# Altium footprint library WR-TBL_Pluggable Connector_3.81mm.PcbLib: 201 footprints (part 13 of 13)
Each footprint in its own frame and in the unit in brackets; x right, y up, seen from the top. Pads: shape width x height; smd on the part's side, far side on the other; paste and mask are expansions set on the pad; w line width, h text height; cw(c..) or ccw(c..) is an arc to the next point about the centre after c.
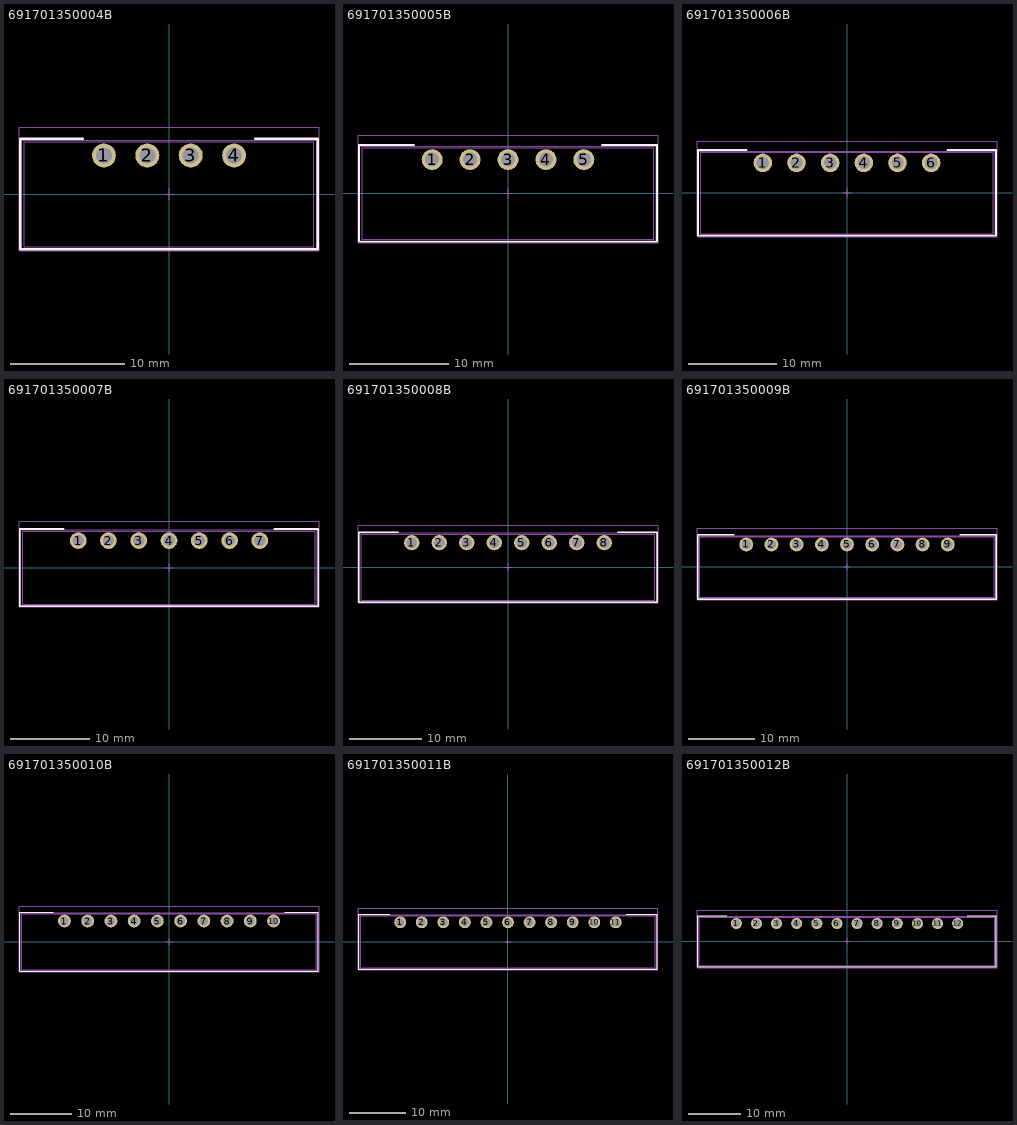
[diagram p12: the footprints below, top view; thin cyan lines are the x and y axes]

## 691701350004B [mm] "Horizontal PCB Header THR Type with Flanges, pitch 3.81mm, 04p"
height 7.3
pads (4):
  round 2.1 hole 1.4: 1(-5.715,3.4) 2(-1.905,3.4) 3(1.905,3.4) 4(5.715,3.4)
Top Overlay:
  lines w0.2: -7.56,4.85 -13.065,4.85 -13.065,-4.85 13.065,-4.85 13.065,4.85 7.56,4.85
Top Paste:
  region: -3.455,5.65 -0.355,5.65 -0.355,1.15 -3.455,1.15
  region: -7.265,5.65 -4.165,5.65 -4.165,1.15 -7.265,1.15
  region: 0.355,5.65 3.455,5.65 3.455,1.15 0.355,1.15
  region: 4.165,5.65 7.265,5.65 7.265,1.15 4.165,1.15
Assembly Notes:
  text "Stencil thickness : 120 μm" at -5.156,-5.651 h1
Top Assembly:
  lines w0.1: -12.965,-4.75 -12.965,4.75 12.965,4.75 12.965,-4.75 -12.965,-4.75
Top Designator:
  text ".Designator" at -3.647,-0.357 h1
Top 3D Body:
  lines w0.1: -12.715,-4.6 -12.715,4.6 12.715,4.6 12.715,-4.6 -12.715,-4.6
Top Courtyard:
  lines w0.05: -13.165,-4.95 -13.165,5.85 13.165,5.85 13.165,-4.95 -13.165,-4.95
Top Component Center:
  lines w0.1: -0.5,0 0.5,0 ; 0,-0.5 0,0.5
3D body "691701350004B.stp": height 7.1, standoff -2.5, extent -12.715,-4.61 12.715,4.6

## 691701350005B [mm] "Horizontal PCB Header THR Type with Flanges, pitch 3.81mm, 05p"
height 7.3
pads (5):
  round 2.1 hole 1.4: 1(-7.62,3.4) 2(-3.81,3.4) 3(0,3.4) 4(3.81,3.4) 5(7.62,3.4)
Top Overlay:
  lines w0.2: -9.465,4.85 -14.97,4.85 -14.97,-4.85 14.97,-4.85 14.97,4.85 9.465,4.85
Top Paste:
  region: 6.07,5.65 9.17,5.65 9.17,1.15 6.07,1.15
  region: 2.26,5.65 5.36,5.65 5.36,1.15 2.26,1.15
  region: -1.55,5.65 1.55,5.65 1.55,1.15 -1.55,1.15
  region: -9.17,5.65 -6.07,5.65 -6.07,1.15 -9.17,1.15
  region: -5.36,5.65 -2.26,5.65 -2.26,1.15 -5.36,1.15
Assembly Notes:
  text "Stencil thickness : 120 μm" at -5.156,-5.651 h1
Top Assembly:
  lines w0.1: -14.87,-4.75 -14.87,4.75 14.87,4.75 14.87,-4.75 -14.87,-4.75
Top Designator:
  text ".Designator" at -3.647,-0.357 h1
Top 3D Body:
  lines w0.1: -14.62,-4.6 -14.62,4.6 14.62,4.6 14.62,-4.6 -14.62,-4.6
Top Courtyard:
  lines w0.05: -15.07,-4.95 -15.07,5.85 15.07,5.85 15.07,-4.95 -15.07,-4.95
Top Component Center:
  lines w0.1: -0.5,0 0.5,0 ; 0,-0.5 0,0.5
3D body "691701350005B.stp": height 7.1, standoff -2.5, extent -14.62,-4.61 14.62,4.6

## 691701350006B [mm] "Horizontal PCB Header THR Type with Flanges, pitch 3.81mm, 06p"
height 7.3
pads (6):
  round 2.1 hole 1.4: 1(-9.525,3.4) 2(-5.715,3.4) 3(-1.905,3.4) 4(1.905,3.4) 5(5.715,3.4) 6(9.525,3.4)
Top Overlay:
  lines w0.2: -11.37,4.85 -16.875,4.85 -16.875,-4.85 16.875,-4.85 16.875,4.85 11.37,4.85
Top Paste:
  region: 4.165,5.65 7.265,5.65 7.265,1.15 4.165,1.15
  region: 0.355,5.65 3.455,5.65 3.455,1.15 0.355,1.15
  region: -3.455,5.65 -0.355,5.65 -0.355,1.15 -3.455,1.15
  region: -11.075,5.65 -7.975,5.65 -7.975,1.15 -11.075,1.15
  region: -7.265,5.65 -4.165,5.65 -4.165,1.15 -7.265,1.15
  region: 7.975,5.65 11.075,5.65 11.075,1.15 7.975,1.15
Assembly Notes:
  text "Stencil thickness : 120 μm" at -5.156,-5.651 h1
Top Assembly:
  lines w0.1: -16.775,-4.75 -16.775,4.75 16.775,4.75 16.775,-4.75 -16.775,-4.75
Top Designator:
  text ".Designator" at -3.647,-0.357 h1
Top 3D Body:
  lines w0.1: -16.525,-4.6 -16.525,4.6 16.525,4.6 16.525,-4.6 -16.525,-4.6
Top Courtyard:
  lines w0.05: -16.975,-4.95 -16.975,5.85 16.975,5.85 16.975,-4.95 -16.975,-4.95
Top Component Center:
  lines w0.1: -0.5,0 0.5,0 ; 0,-0.5 0,0.5
3D body "691701350006B.stp": height 7.1, standoff -2.5, extent -16.525,-4.61 16.525,4.6

## 691701350007B [mm] "Horizontal PCB Header THR Type with Flanges, pitch 3.81mm, 07p"
height 7.3
pads (7):
  round 2.1 hole 1.4: 1(-11.43,3.4) 2(-7.62,3.4) 3(-3.81,3.4) 4(0,3.4) 5(3.81,3.4) 6(7.62,3.4) 7(11.43,3.4)
Top Overlay:
  lines w0.2: -13.275,4.85 -18.78,4.85 -18.78,-4.85 18.78,-4.85 18.78,4.85 13.275,4.85
Top Paste:
  region: 6.07,5.65 9.17,5.65 9.17,1.15 6.07,1.15
  region: -9.17,5.65 -6.07,5.65 -6.07,1.15 -9.17,1.15
  region: -12.98,5.65 -9.88,5.65 -9.88,1.15 -12.98,1.15
  region: -5.36,5.65 -2.26,5.65 -2.26,1.15 -5.36,1.15
  region: -1.55,5.65 1.55,5.65 1.55,1.15 -1.55,1.15
  region: 2.26,5.65 5.36,5.65 5.36,1.15 2.26,1.15
  region: 9.88,5.65 12.98,5.65 12.98,1.15 9.88,1.15
Assembly Notes:
  text "Stencil thickness : 120 μm" at -5.156,-5.651 h1
Top Assembly:
  lines w0.1: -18.68,-4.75 -18.68,4.75 18.68,4.75 18.68,-4.75 -18.68,-4.75
Top Designator:
  text ".Designator" at -3.647,-0.357 h1
Top 3D Body:
  lines w0.1: -18.43,-4.6 -18.43,4.6 18.43,4.6 18.43,-4.6 -18.43,-4.6
Top Courtyard:
  lines w0.05: -18.88,-4.95 -18.88,5.85 18.88,5.85 18.88,-4.95 -18.88,-4.95
Top Component Center:
  lines w0.1: -0.5,0 0.5,0 ; 0,-0.5 0,0.5
3D body "691701350007B.stp": height 7.1, standoff -2.5, extent -18.43,-4.6 18.43,4.61

## 691701350008B [mm] "Horizontal PCB Header THR Type with Flanges, pitch 3.81mm, 08p"
height 7.3
pads (8):
  round 2.1 hole 1.4: 1(-13.335,3.4) 2(-9.525,3.4) 3(-5.715,3.4) 4(-1.905,3.4) 5(1.905,3.4) 6(5.715,3.4) 7(9.525,3.4) 8(13.335,3.4)
Top Overlay:
  lines w0.2: -15.18,4.85 -20.685,4.85 -20.685,-4.85 20.685,-4.85 20.685,4.85 15.18,4.85
Top Paste:
  region: 11.785,5.65 14.885,5.65 14.885,1.15 11.785,1.15
  region: 4.165,5.65 7.265,5.65 7.265,1.15 4.165,1.15
  region: -11.075,5.65 -7.975,5.65 -7.975,1.15 -11.075,1.15
  region: -14.885,5.65 -11.785,5.65 -11.785,1.15 -14.885,1.15
  region: -7.265,5.65 -4.165,5.65 -4.165,1.15 -7.265,1.15
  region: -3.455,5.65 -0.355,5.65 -0.355,1.15 -3.455,1.15
  region: 0.355,5.65 3.455,5.65 3.455,1.15 0.355,1.15
  region: 7.975,5.65 11.075,5.65 11.075,1.15 7.975,1.15
Assembly Notes:
  text "Stencil thickness : 120 μm" at -5.156,-5.651 h1
Top Assembly:
  lines w0.1: -20.585,-4.75 -20.585,4.75 20.585,4.75 20.585,-4.75 -20.585,-4.75
Top Designator:
  text ".Designator" at -3.647,-0.357 h1
Top 3D Body:
  lines w0.1: -20.335,-4.6 -20.335,4.6 20.335,4.6 20.335,-4.6 -20.335,-4.6
Top Courtyard:
  lines w0.05: -20.785,-4.95 -20.785,5.85 20.785,5.85 20.785,-4.95 -20.785,-4.95
Top Component Center:
  lines w0.1: -0.5,0 0.5,0 ; 0,-0.5 0,0.5
3D body "691701350008B.stp": height 7.1, standoff -2.5, extent -20.335,-4.61 20.335,4.6

## 691701350009B [mm] "Horizontal PCB Header THR Type with Flanges, pitch 3.81mm, 09p"
height 7.3
pads (9):
  round 2.1 hole 1.4: 1(-15.24,3.4) 2(-11.43,3.4) 3(-7.62,3.4) 4(-3.81,3.4) 5(0,3.4) 6(3.81,3.4) 7(7.62,3.4) 8(11.43,3.4) 9(15.24,3.4)
Top Overlay:
  lines w0.2: -17.085,4.85 -22.59,4.85 -22.59,-4.85 22.59,-4.85 22.59,4.85 17.085,4.85
Top Paste:
  region: 13.69,5.65 16.79,5.65 16.79,1.15 13.69,1.15
  region: 9.88,5.65 12.98,5.65 12.98,1.15 9.88,1.15
  region: 2.26,5.65 5.36,5.65 5.36,1.15 2.26,1.15
  region: -12.98,5.65 -9.88,5.65 -9.88,1.15 -12.98,1.15
  region: -16.79,5.65 -13.69,5.65 -13.69,1.15 -16.79,1.15
  region: -9.17,5.65 -6.07,5.65 -6.07,1.15 -9.17,1.15
  region: -5.36,5.65 -2.26,5.65 -2.26,1.15 -5.36,1.15
  region: -1.55,5.65 1.55,5.65 1.55,1.15 -1.55,1.15
  region: 6.07,5.65 9.17,5.65 9.17,1.15 6.07,1.15
Assembly Notes:
  text "Stencil thickness : 120 μm" at -5.156,-5.651 h1
Top Assembly:
  lines w0.1: -22.49,-4.75 -22.49,4.75 22.49,4.75 22.49,-4.75 -22.49,-4.75
Top Designator:
  text ".Designator" at -3.647,-0.357 h1
Top 3D Body:
  lines w0.1: -22.24,-4.6 -22.24,4.6 22.24,4.6 22.24,-4.6 -22.24,-4.6
Top Courtyard:
  lines w0.05: -22.69,-4.95 -22.69,5.85 22.69,5.85 22.69,-4.95 -22.69,-4.95
Top Component Center:
  lines w0.1: -0.5,0 0.5,0 ; 0,-0.5 0,0.5
3D body "691701350009B.stp": height 7.1, standoff -2.5, extent -22.24,-4.61 22.24,4.6

## 691701350010B [mm] "Horizontal PCB Header THR Type with Flanges, pitch 3.81mm, 10p"
height 7.3
pads (10):
  round 2.1 hole 1.4: 1(-17.145,3.4) 2(-13.335,3.4) 3(-9.525,3.4) 4(-5.715,3.4) 5(-1.905,3.4) 6(1.905,3.4) 7(5.715,3.4) 8(9.525,3.4) 9(13.335,3.4) 10(17.145,3.4)
Top Overlay:
  lines w0.2: -18.99,4.85 -24.495,4.85 -24.495,-4.85 24.495,-4.85 24.495,4.85 18.99,4.85
Top Paste:
  region: 11.785,5.65 14.885,5.65 14.885,1.15 11.785,1.15
  region: 7.975,5.65 11.075,5.65 11.075,1.15 7.975,1.15
  region: 0.355,5.65 3.455,5.65 3.455,1.15 0.355,1.15
  region: -14.885,5.65 -11.785,5.65 -11.785,1.15 -14.885,1.15
  region: -18.695,5.65 -15.595,5.65 -15.595,1.15 -18.695,1.15
  region: -11.075,5.65 -7.975,5.65 -7.975,1.15 -11.075,1.15
  region: -7.265,5.65 -4.165,5.65 -4.165,1.15 -7.265,1.15
  region: -3.455,5.65 -0.355,5.65 -0.355,1.15 -3.455,1.15
  region: 4.165,5.65 7.265,5.65 7.265,1.15 4.165,1.15
  region: 15.595,5.65 18.695,5.65 18.695,1.15 15.595,1.15
Assembly Notes:
  text "Stencil thickness : 120 μm" at -5.156,-5.651 h1
Top Assembly:
  lines w0.1: -24.395,-4.75 -24.395,4.75 24.395,4.75 24.395,-4.75 -24.395,-4.75
Top Designator:
  text ".Designator" at -3.647,-0.357 h1
Top 3D Body:
  lines w0.1: -24.145,-4.6 -24.145,4.6 24.145,4.6 24.145,-4.6 -24.145,-4.6
Top Courtyard:
  lines w0.05: -24.595,-4.95 -24.595,5.85 24.595,5.85 24.595,-4.95 -24.595,-4.95
Top Component Center:
  lines w0.1: -0.5,0 0.5,0 ; 0,-0.5 0,0.5
3D body "691701350010B.stp": height 7.1, standoff -2.5, extent -24.145,-4.61 24.145,4.6

## 691701350011B [mm] "Horizontal PCB Header THR Type with Flanges, pitch 3.81mm, 11p"
height 7.3
pads (11):
  round 2.1 hole 1.4: 1(-19.05,3.4) 2(-15.24,3.4) 3(-11.43,3.4) 4(-7.62,3.4) 5(-3.81,3.4) 6(0,3.4) 7(3.81,3.4) 8(7.62,3.4) 9(11.43,3.4) 10(15.24,3.4) 11(19.05,3.4)
Top Overlay:
  lines w0.2: -20.895,4.85 -26.4,4.85 -26.4,-4.85 26.4,-4.85 26.4,4.85 20.895,4.85
Top Paste:
  region: 9.88,5.65 12.98,5.65 12.98,1.15 9.88,1.15
  region: 6.07,5.65 9.17,5.65 9.17,1.15 6.07,1.15
  region: -1.55,5.65 1.55,5.65 1.55,1.15 -1.55,1.15
  region: -16.79,5.65 -13.69,5.65 -13.69,1.15 -16.79,1.15
  region: -20.6,5.65 -17.5,5.65 -17.5,1.15 -20.6,1.15
  region: -12.98,5.65 -9.88,5.65 -9.88,1.15 -12.98,1.15
  region: -9.17,5.65 -6.07,5.65 -6.07,1.15 -9.17,1.15
  region: -5.36,5.65 -2.26,5.65 -2.26,1.15 -5.36,1.15
  region: 2.26,5.65 5.36,5.65 5.36,1.15 2.26,1.15
  region: 13.69,5.65 16.79,5.65 16.79,1.15 13.69,1.15
  region: 17.5,5.65 20.6,5.65 20.6,1.15 17.5,1.15
Assembly Notes:
  text "Stencil thickness : 120 μm" at -5.156,-5.651 h1
Top Assembly:
  lines w0.1: -26.3,-4.75 -26.3,4.75 26.3,4.75 26.3,-4.75 -26.3,-4.75
Top Designator:
  text ".Designator" at -3.647,-0.357 h1
Top 3D Body:
  lines w0.1: -26.05,-4.6 -26.05,4.6 26.05,4.6 26.05,-4.6 -26.05,-4.6
Top Courtyard:
  lines w0.05: -26.5,-4.95 -26.5,5.85 26.5,5.85 26.5,-4.95 -26.5,-4.95
Top Component Center:
  lines w0.1: -0.5,0 0.5,0 ; 0,-0.5 0,0.5
3D body "691701350011B.stp": height 7.1, standoff -2.5, extent -26.05,-4.61 26.05,4.6

## 691701350012B [mm] "Horizontal PCB Header THR Type with Flanges, pitch 3.81mm, 12p"
height 7.3
pads (12):
  round 2.1 hole 1.4: 1(-20.955,3.4) 2(-17.145,3.4) 3(-13.335,3.4) 4(-9.525,3.4) 5(-5.715,3.4) 6(-1.905,3.4) 7(1.905,3.4) 8(5.715,3.4) 9(9.525,3.4) 10(13.335,3.4) 11(17.145,3.4) 12(20.955,3.4)
Top Overlay:
  lines w0.2: -22.8,4.85 -28.305,4.85 -28.305,-4.85 28.305,-4.85 28.305,4.85 22.8,4.85
Top Paste:
  region: 19.405,5.65 22.505,5.65 22.505,1.15 19.405,1.15
  region: 7.975,5.65 11.075,5.65 11.075,1.15 7.975,1.15
  region: 4.165,5.65 7.265,5.65 7.265,1.15 4.165,1.15
  region: -3.455,5.65 -0.355,5.65 -0.355,1.15 -3.455,1.15
  region: -18.695,5.65 -15.595,5.65 -15.595,1.15 -18.695,1.15
  region: -22.505,5.65 -19.405,5.65 -19.405,1.15 -22.505,1.15
  region: -14.885,5.65 -11.785,5.65 -11.785,1.15 -14.885,1.15
  region: -11.075,5.65 -7.975,5.65 -7.975,1.15 -11.075,1.15
  region: -7.265,5.65 -4.165,5.65 -4.165,1.15 -7.265,1.15
  region: 0.355,5.65 3.455,5.65 3.455,1.15 0.355,1.15
  region: 11.785,5.65 14.885,5.65 14.885,1.15 11.785,1.15
  region: 15.595,5.65 18.695,5.65 18.695,1.15 15.595,1.15
Assembly Notes:
  text "Stencil thickness : 120 μm" at -5.156,-5.651 h1
Top Assembly:
  lines w0.1: -28.205,-4.75 -28.205,4.75 28.205,4.75 28.205,-4.75 -28.205,-4.75
Top Designator:
  text ".Designator" at -3.647,-0.357 h1
Top 3D Body:
  lines w0.1: -27.955,-4.6 -27.955,4.6 27.955,4.6 27.955,-4.6 -27.955,-4.6
Top Courtyard:
  lines w0.05: -28.405,-4.95 -28.405,5.85 28.405,5.85 28.405,-4.95 -28.405,-4.95
Top Component Center:
  lines w0.1: -0.5,0 0.5,0 ; 0,-0.5 0,0.5
3D body "691701350012B.stp": height 7.1, standoff -2.5, extent -27.955,-4.61 27.955,4.6